# Altium footprint library amirlib.PcbLib: 456 footprints (part 10 of 29)
Each footprint in its own frame and in the unit in brackets; x right, y up, seen from the top. Pads: shape width x height; smd on the part's side, far side on the other; paste and mask are expansions set on the pad; w line width, h text height; cw(c..) or ccw(c..) is an arc to the next point about the centre after c.
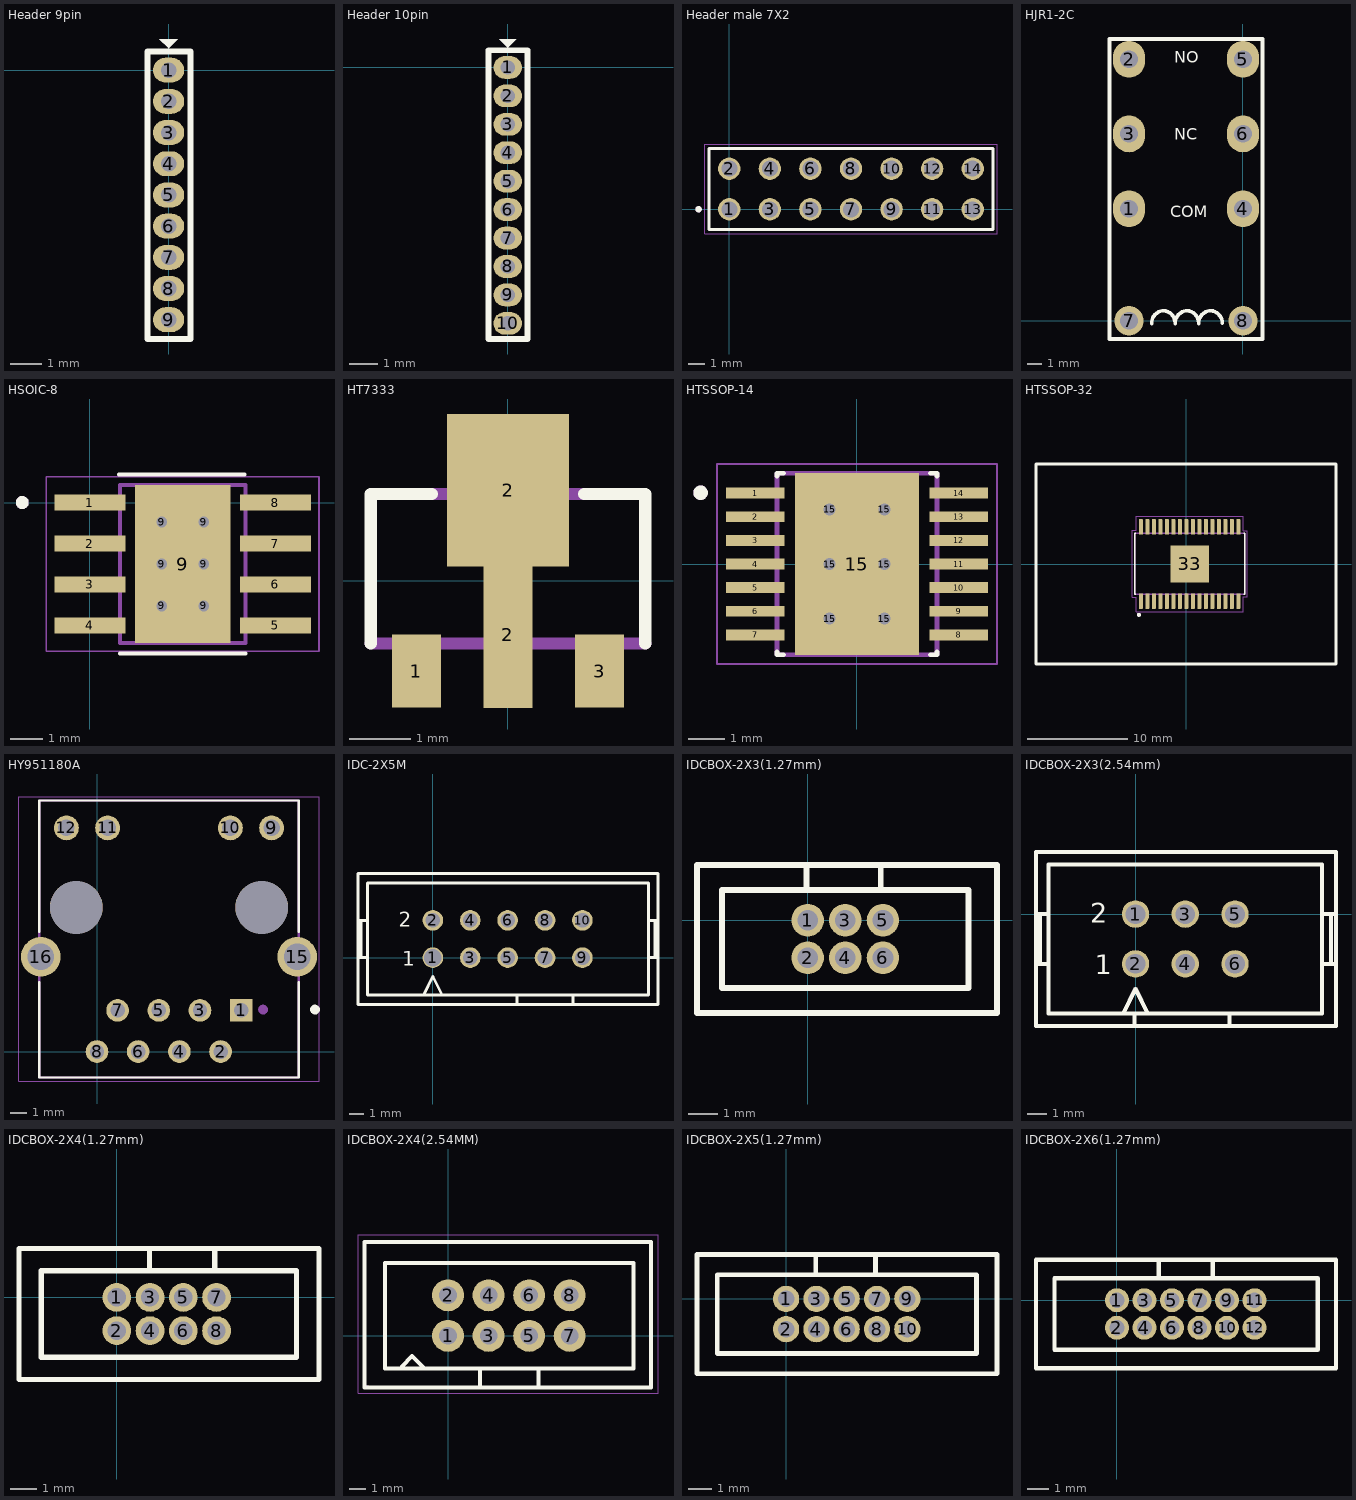
[diagram p9: the footprints below, top view; thin cyan lines are the x and y axes]

## Header 9pin [mm]
pads (9):
  oval 1x0.8 hole 0.5 mask+0.05: 1(0,0) 2(0,-1) 3(0,-2) 4(0,-3) 5(0,-4) 6(0,-5) 7(0,-6) 8(0,-7) 9(0,-8)
Top Overlay:
  region: 0,0.7 0.3,1 -0.3,1
  lines w0.2: -0.675,-8.619 -0.675,0.6 0.7,0.6 0.7,-8.619 -0.675,-8.619

## Header 10pin [mm]
pads (10):
  oval 1x0.8 hole 0.5 mask+0.05: 1(0,0) 2(0,-1) 3(0,-2) 4(0,-3) 5(0,-4) 6(0,-5) 7(0,-6) 8(0,-7) 9(0,-8) 10(0,-9)
Top Overlay:
  region: 0,0.7 0.3,1 -0.3,1
  lines w0.2: -0.675,-9.55 0.7,-9.55 0.7,0.6 -0.675,0.6 -0.675,-9.55

## Header male 7X2 [mm]
pads (14):
  round 1.4 / inner round 1.4 / far side oval 1.4x2.2 hole 1: 1(0,0) 2(0,2.54) 3(2.54,0) 4(2.54,2.54) 5(5.08,0) 6(5.08,2.54) 7(7.62,0) 8(7.62,2.54) 9(10.16,0) 10(10.16,2.54) 11(12.7,0) 12(12.7,2.54) 13(15.24,0) 14(15.24,2.54)
Top Overlay:
  circle w0.2: c-1.92,0 r0.1
  lines w0.2: -1.27,-1.27 -1.27,3.81 16.51,3.81 16.51,-1.27 -1.27,-1.27
Mechanical 13:
  circle w0.2: c-1.92,0 r0.1
  lines w0.1: -1.27,-1.27 -1.27,3.81 16.51,3.81 16.51,-1.27 -1.27,-1.27
Mechanical 15:
  lines w0.05: -1.52,-1.52 -1.52,4.06 16.76,4.06 16.76,-1.52 -1.52,-1.52
3D body "TSW-107-19-G-D-LL.stp": height 23.37, standoff -2.79, extent -1.194,-1.295 16.586,3.785

## HJR1-2C [mm]
pads (8):
  oval 2.2x2.5 hole 1.2: 1(-7.747,7.62) 2(-7.747,17.78) 3(-7.747,12.7) 4(0,7.62) 5(0,17.78) 6(0,12.7)
  round 2 hole 1.2: 7(-7.747,0) 8(0,0)
Top Overlay:
  lines w0.254: -6.21,-0.189 cw(c-5.36,-0.164) -5.36,0.686 ; -5.385,0.686 cw(c-5.46,-0.164) -4.606,-0.164 ; -4.61,-0.189 cw(c-3.76,-0.164) -3.76,0.686 ; -3.785,0.686 cw(c-3.86,-0.164) -3.006,-0.164 ; -3.01,-0.189 cw(c-2.16,-0.164) -2.16,0.686 ; -2.185,0.686 cw(c-2.26,-0.164) -1.406,-0.164 ; -9.068,-1.24 -9.068,19.152 1.321,19.152 1.321,-1.24 -9.068,-1.24
  text "COM" at -4.941,7.048 h0.8
  text "NC" at -4.687,12.293 h0.8
  text "NO" at -4.687,17.538 h0.8
3D body "Ultra-Miniature_Relay_HJR_Series.step": height 12.05, standoff -3.4, extent -8.861,-1.11 1.139,18.89

## HSOIC-8 [mm]
pads (15):
  rect 2.2x0.5 smd paste-0.025 mask+0.07: 1(0,0) 2(0,-1.27) 3(0,-2.54) 4(0,-3.81) 5(5.75,-3.81) 6(5.75,-2.54) 7(5.75,-1.27) 8(5.75,0)
  round 0.44 hole 0.33: 9(2.225,-3.205) 9(2.225,-1.905) 9(2.225,-0.605) 9(3.525,-3.205) 9(3.525,-1.905) 9(3.525,-0.605)
  rect 2.95x4.9 smd paste-3 mask+0: 9(2.875,-1.905)
Top Overlay:
  circle w0.2: c-2.1,0 r0.1
  lines w0.127: 0.895,0.865 4.795,0.865 ; 0.925,-4.675 4.825,-4.675
Top Paste:
  region: 4.175,-3.555 1.575,-3.555 1.575,-0.255 4.175,-0.255
Top Solder:
  region: 4.175,-3.555 1.575,-3.555 1.575,-0.255 4.175,-0.255
Mechanical 13:
  circle w0.2: c-2.1,0 r0.1
  lines w0.127: 0.925,-4.355 4.825,-4.355 4.825,0.545 0.925,0.545 0.925,-4.355
Mechanical 15:
  lines w0.05: -1.35,-4.605 -1.35,0.795 7.1,0.795 7.1,-4.605 -1.35,-4.605
3D body "step_temp.STEP": height 1.7, standoff 0, extent -0.125,-4.355 5.875,0.545

## HT7333 [mm]
pads (4):
  rect 0.8x1.2 smd: 1(-1.5,-1.48) 3(1.5,-1.48)
  rect 0.8x2.4 smd paste-2 mask+0: 2(0,-0.889)
  rect 2x2.5 smd: 2(0,1.48)
Top Overlay:
  lines w0.203: -2.25,-1.03 -2.25,1.42 -1.25,1.42 ; 1.25,1.42 2.25,1.42 2.25,-1.03
Top Paste:
  region: 0.4,-2.086 -0.401,-2.086 -0.401,-0.88 0.4,-0.88
Top Solder:
  region: 0.5,-2.184 -0.501,-2.184 -0.501,-0.78 0.5,-0.78
Mechanical 13:
  region: 0.787,1.795 0.787,1.515 -0.787,1.515 -0.787,1.795 -0.356,2.226 0.356,2.226
  region: 0.279,-1.894 -0.28,-1.894 -0.28,-1.05 0.279,-1.05
  region: 1.727,-1.892 1.272,-1.892 1.272,-1.05 1.727,-1.05
  region: -1.27,-1.895 -1.733,-1.895 -1.733,-1.05 -1.27,-1.05
  lines w0.203: -2.25,-1.03 2.25,-1.03 ; -1.25,1.42 1.25,1.42 ; -0.787,1.515 -0.787,1.795 -0.356,2.226 0.356,2.226 0.787,1.795 0.787,1.515 -0.787,1.515
3D body "BCX56-10,115.STEP": height 1.6, standoff 0, extent -2.199,-1.894 2.301,2.106

## HTSSOP-14 [mm]
pads (21):
  rect 1.6x0.3 smd paste-0.025: 1(-2.8,1.95) 2(-2.8,1.3) 3(-2.8,0.65) 4(-2.8,0) 5(-2.8,-0.65) 6(-2.8,-1.3) 7(-2.8,-1.95) 8(2.8,-1.95) 9(2.8,-1.3) 10(2.8,-0.65) 11(2.8,0) 12(2.8,0.65) 13(2.8,1.3) 14(2.8,1.95)
  round 0.43 hole 0.33 mask+0: 15(-0.75,-1.5) 15(-0.75,0) 15(-0.75,1.5) 15(0.75,-1.5) 15(0.75,0) 15(0.75,1.5)
  rect 3.4x5 smd paste-3 mask+0: 15(0,0)
Top Overlay:
  circle w0.2: c-4.3,1.96 r0.1
  lines w0.127: -2.2,-2.42 -2.2,-2.5 -2.02,-2.5 ; -2.2,2.42 -2.2,2.5 -2.02,2.5 ; 2.02,-2.5 2.2,-2.5 2.2,-2.42 ; 2.02,2.5 2.2,2.5 2.2,2.42
Top Paste:
  region: 1.23,-1.155 -1.23,-1.155 -1.23,1.155 1.23,1.155
Top Solder:
  region: 1.23,-1.155 -1.23,-1.155 -1.23,1.155 1.23,1.155
Mechanical 13:
  circle w0.2: c-4.3,1.96 r0.1
  lines w0.127: -2.2,-2.5 2.2,-2.5 2.2,2.5 -2.2,2.5 -2.2,-2.5
Mechanical 15:
  lines w0.05: -3.85,-2.75 3.85,-2.75 3.85,2.75 -3.85,2.75 -3.85,-2.75
3D body "step_temp.STEP": height 1.2, standoff 0, extent -3.2,-2.5 3.2,2.5

## HTSSOP-32 [mm]
pads (33):
  rrect50% 0.41x1.57 smd: 1(-4.505,-3.72) 2(-3.855,-3.72) 3(-3.205,-3.72) 4(-2.555,-3.72) 5(-1.905,-3.72) 6(-1.255,-3.72) 7(-0.605,-3.72) 8(0.045,-3.72) 9(0.695,-3.72) 10(1.345,-3.72) 11(1.995,-3.72) 12(2.645,-3.72) 13(3.295,-3.72) 14(3.945,-3.72) 15(4.595,-3.72) 16(5.245,-3.72) 17(5.245,3.72) 18(4.595,3.72) 19(3.945,3.72) 20(3.295,3.72) 21(2.645,3.72) 22(1.995,3.72) 23(1.345,3.72) 24(0.695,3.72) 25(0.045,3.72) 26(-0.605,3.72) 27(-1.255,3.72) 28(-1.905,3.72) 29(-2.555,3.72) 30(-3.205,3.72) 31(-3.855,3.72) 32(-4.505,3.72)
  rect 3.81x3.71 smd paste-3: 33(0.37,0)
Top Overlay:
  circle w0.2: c-4.71,-5.08 r0.1
  lines w0.127: -5.03,-3.05 -5.13,-3.05 -5.13,3.05 -5.03,3.05 ; 5.77,-3.05 5.87,-3.05 5.87,3.05 5.77,3.05
  lines w0.254: -15,-10 -15,10 15,10 15,-10 -15,-10
Top Paste:
  region: 0.185,1.485 0.185,0.185 -1.165,0.185 -1.165,1.485
  region: 0.185,-0.185 0.185,-1.485 -1.165,-1.485 -1.165,-0.185
  region: 1.905,-0.185 1.905,-1.485 0.555,-1.485 0.555,-0.185
  region: 1.905,1.485 1.905,0.185 0.555,0.185 0.555,1.485
Mechanical 13:
  circle w0.2: c-4.71,-5.08 r0.1
  lines w0: -4.659,-3.099 -4.354,-3.099 ; -4.659,3.099 -4.354,3.099 ; -3.999,-3.099 -3.694,-3.099 ; -3.999,3.099 -3.694,3.099 ; -3.364,-3.099 -3.059,-3.099 ; -3.364,3.099 -3.059,3.099 ; -2.703,-3.099 -2.399,-3.099 ; -2.703,3.099 -2.399,3.099 ; -2.043,-3.099 -1.764,-3.099 ; -2.043,3.099 -1.764,3.099 ; -1.408,-3.099 -1.103,-3.099 ; -1.408,3.099 -1.103,3.099 ; -0.748,-3.099 -0.443,-3.099 ; -0.748,3.099 -0.443,3.099 ; -0.113,-3.099 0.192,-3.099 ; -0.113,3.099 0.192,3.099 ; 0.548,-3.099 0.853,-3.099 ; 0.548,3.099 0.853,3.099 ; 1.183,-3.099 1.488,-3.099 ; 1.183,3.099 1.488,3.099 ; 1.843,-3.099 2.148,-3.099 ; 1.843,3.099 2.148,3.099 ; 2.504,-3.099 2.783,-3.099 ; 2.504,3.099 2.783,3.099 ; 3.139,-3.099 3.443,-3.099 ; 3.139,3.099 3.443,3.099 ; 3.799,-3.099 4.104,-3.099 ; 3.799,3.099 4.104,3.099 ; 4.434,-3.099 4.739,-3.099 ; 4.434,3.099 4.739,3.099 ; 5.094,-3.099 5.399,-3.099 ; 5.094,3.099 5.399,3.099
  lines w0.127: -5.13,-3.05 -5.13,3.05 5.87,3.05 5.87,-3.05 -5.13,-3.05
Mechanical 15:
  lines w0.05: -5.38,-3.35 -4.96,-3.35 -4.96,-4.76 5.7,-4.76 5.7,-3.3 6.12,-3.3 6.12,3.3 5.7,3.3 5.7,4.76 -4.96,4.76 -4.96,3.35 -5.38,3.35 -5.38,-3.35
3D body "TPA3116D2DADR.STEP": height 1.2, standoff 0, extent -5.13,-4.05 5.87,4.05

## HY951180A [mm]
pads (16):
  rect 1.398x1.398 hole 0.89: 1(8.89,2.54)
  round 1.398 hole 0.89: 2(7.62,0) 3(6.35,2.54) 4(5.08,0) 5(3.81,2.54) 6(2.54,0) 7(1.27,2.54) 8(0,0)
  round 1.53 hole 1.02: 9(10.765,13.79) 10(8.225,13.79) 11(0.655,13.79) 12(-1.885,13.79)
  round 2.445 hole 1.63: 15(12.34,5.84) 16(-3.46,5.84)
  round 3.25 hole 3.25 unplated: ""(-1.275,8.89) ""(10.155,8.89)
Top Overlay:
  circle w0.3: c13.44,2.59 r0.15
  lines w0.127: -3.56,4.29 -3.56,-1.59 12.44,-1.59 12.44,4.29 ; -3.56,7.39 -3.56,15.494 12.44,15.494 12.44,7.39
Mechanical 13:
  circle w0.3: c10.24,2.59 r0.15
  lines w0.127: -3.56,-1.59 -3.56,15.494 12.44,15.494 12.44,-1.59 -3.56,-1.59
Mechanical 15:
  lines w0.05: -4.81,-1.84 -4.81,15.723 13.69,15.723 13.69,-1.84 -4.81,-1.84

## IDC-2X5M [mm]
pads (10):
  round 1.4 / inner round 1.4 / far side oval 1.4x2.2 hole 1.2 mask+0.1: 1(0,0)
  round 1.4 / inner round 1.4 / far side oval 1.4x2.2 hole 1 mask+0.1: 2(0,2.54) 3(2.54,0) 4(2.54,2.54) 5(5.08,0) 6(5.08,2.54) 7(7.62,0) 8(7.62,2.54) 9(10.16,0) 10(10.16,2.54)
Top Overlay:
  lines w0.2: -5.08,0 -4.445,0 ; -5.08,2.54 -4.445,2.54 ; -4.868,0 -4.868,2.54 ; -0.635,-2.54 0,-1.27 0.635,-2.54 ; 5.715,-3.175 5.715,-2.54 ; 9.525,-3.175 9.525,-2.54 ; 14.656,0 15.291,0 ; 14.656,2.54 15.291,2.54 ; 15.079,0 15.079,2.54 ; 5.715,-2.54 -4.445,-2.54 -4.445,5.08 14.656,5.08 14.656,-2.54 9.525,-2.54 ; 5.715,-2.54 9.525,-2.54 ; -5.08,-3.175 -5.08,5.715 15.291,5.715 15.291,-3.175 -5.08,-3.175
  text "1" at -2.084,-0.534 h1
  text "2" at -2.313,2.108 h1
3D body "User Library-IDC-10M.STEP": height 9.3, standoff -3.1, extent -5.056,-3.152 15.244,5.946

## IDCBOX-2X3(1.27mm) [mm]
pads (6):
  round 1.1 hole 0.7: 1(0,0) 2(0,-1.27) 3(1.27,0) 4(1.27,-1.27) 5(2.54,0) 6(2.54,-1.27)
Top Overlay:
  lines w0.2: -0.032,1.027 -0.032,1.865 ; 2.468,1.041 2.468,1.84 ; -3.735,-3.135 -3.735,1.865 6.391,1.865 6.391,-3.135 -3.735,-3.135 ; -2.885,-2.285 5.425,-2.285 5.425,1.015 -2.885,1.015 -2.885,-2.285
3D body "IDC_1.27mm_2x3.step": height 5.5, standoff -2, extent -3.764,-3.144 6.346,1.956

## IDCBOX-2X3(2.54mm) [mm]
pads (6):
  round 1.4 / inner round 1.4 / far side oval 1.4x2.2 hole 1 mask+0.1: 1(0,0) 2(0,-2.54) 3(2.54,0) 4(2.54,-2.54) 5(5.08,0) 6(5.08,-2.54)
Top Overlay:
  lines w0.2: -5.08,-2.54 -4.445,-2.54 ; -5.08,0 -4.445,0 ; -4.868,-2.54 -4.868,0 ; -0.635,-5.08 0,-3.81 0.635,-5.08 ; -0.051,-5.702 -0.051,-5.131 ; 4.801,-5.69 4.801,-5.093 ; 9.563,-2.54 10.198,-2.54 ; 9.563,0 10.198,0 ; 9.986,-2.54 9.986,0 ; -5.08,-5.715 10.236,-5.715 10.236,3.175 -5.08,3.175 -5.08,-5.715 ; -4.445,-5.08 -4.445,2.54 9.525,2.54 9.525,-5.08 5.715,-5.08 -4.445,-5.08
  text "1" at -2.084,-3.074 h1
  text "2" at -2.313,-0.432 h1
3D body "User Library-BH-06 (IDC-06MS).STEP": height 9.2, standoff -2.8, extent -5.07,-5.831 10.15,3.269

## IDCBOX-2X4(1.27mm) [mm]
pads (8):
  round 1.1 hole 0.7: 1(0,0) 2(0,-1.27) 3(1.27,0) 4(1.27,-1.27) 5(2.54,0) 6(2.54,-1.27) 7(3.81,0) 8(3.81,-1.27)
Top Overlay:
  lines w0.2: 1.245,1.029 1.245,1.867 ; 3.745,1.069 3.745,1.867 ; -3.735,-3.135 -3.735,1.865 7.722,1.865 7.722,-3.135 -3.735,-3.135 ; -2.885,-2.285 6.858,-2.285 6.858,1.015 -2.885,1.015 -2.885,-2.285
3D body "IDC_1.27mm_2x4.step": height 5.45, standoff -2.05, extent -3.735,-3.185 7.645,1.915

## IDCBOX-2X4(2.54MM) [mm]
pads (8):
  round 2 hole 1.1: 1(0,0) 2(0,2.54) 3(2.54,0) 4(2.54,2.54) 5(5.08,0) 6(5.08,2.54) 7(7.62,0) 8(7.62,2.54)
Top Overlay:
  lines w0.254: -3.937,4.563 -3.937,-2.032 1.981,-2.032 ; -3.928,4.572 11.61,4.572 ; -2.896,-1.905 -2.261,-1.27 -1.575,-1.956 -1.575,-1.981 ; 2.007,-3.226 2.007,-2.032 5.664,-2.032 5.664,-3.226 6.477,-3.226 ; 5.69,-2.032 11.633,-2.032 ; 11.633,-2.007 11.633,4.563 ; -5.232,-3.226 12.725,-3.226 12.725,5.893 -5.232,5.893 -5.232,-3.226
Mechanical 15:
  region: -0.32,0.32 0.32,0.32 0.32,-0.32 -0.32,-0.32
  region: -0.32,2.86 0.32,2.86 0.32,2.22 -0.32,2.22
  region: 2.22,0.32 2.86,0.32 2.86,-0.32 2.22,-0.32
  region: 2.22,2.86 2.86,2.86 2.86,2.22 2.22,2.22
  region: 4.76,0.32 5.4,0.32 5.4,-0.32 4.76,-0.32
  region: 4.76,2.86 5.4,2.86 5.4,2.22 4.76,2.22
  region: 7.3,0.32 7.94,0.32 7.94,-0.32 7.3,-0.32
  region: 7.3,2.86 7.94,2.86 7.94,2.22 7.3,2.22
  region: -5.009,-3.142 -5.009,-3.167 -5.044,-3.202 -5.094,-3.202 -5.129,-3.167 -5.129,-3.142 -5.129,-3.118 -5.094,-3.082 -5.044,-3.082 -5.009,-3.118
  lines w0.051: -5.639,-3.581 13.157,-3.581 13.157,6.325 -5.639,6.325 -5.639,-3.581
3D body "612008235121.stp": height 8.9, standoff -3.1, extent -5.145,-3.127 12.675,5.921

## IDCBOX-2X5(1.27mm) [mm]
pads (10):
  round 1.1 hole 0.7: 1(0,0) 2(0,-1.27) 3(1.27,0) 4(1.27,-1.27) 5(2.54,0) 6(2.54,-1.27) 7(3.81,0) 8(3.81,-1.27) 9(5.08,0) 10(5.08,-1.27)
Top Overlay:
  lines w0.2: 1.245,1.029 1.245,1.867 ; 3.745,1.069 3.745,1.867 ; -3.735,-3.135 -3.735,1.865 8.839,1.865 8.839,-3.135 -3.735,-3.135 ; -2.885,-2.285 7.976,-2.285 7.976,1.015 -2.885,1.015 -2.885,-2.285
3D body "62701021621.stp": height 4.95, standoff -2.35, extent -3.785,-3.196 8.915,1.854

## IDCBOX-2X6(1.27mm) [mm]
pads (12):
  round 1.1 hole 0.7: 1(0,0) 2(0,-1.27) 3(1.27,0) 4(1.27,-1.27) 5(2.54,0) 6(2.54,-1.27) 7(3.81,0) 8(3.81,-1.27) 9(5.08,0) 10(5.08,-1.27) 11(6.35,0) 12(6.35,-1.27)
Top Overlay:
  lines w0.2: 1.925,1.027 1.925,1.865 ; 4.425,1.067 4.425,1.865 ; 10.085,1.865 -3.735,1.865 -3.735,-3.135 10.109,-3.135 10.109,1.865 ; -2.885,-2.285 9.27,-2.285 9.27,1.015 -2.885,1.015 -2.885,-2.285
3D body "62701221621.stp": height 4.95, standoff -2.35, extent -3.837,-3.124 10.133,1.926